# Altium schematic symbol library BAT-HLD-001-THM.SCHLIB: 1 symbol
Pins are listed as number, name and electrical type; pins without a type are passive.

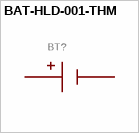
[diagram p0: symbol BAT-HLD-001-THM]

## BAT-HLD-001-THM
designator BT?
GateName_1: G$1; SymbolName_1: BAT-HLD-001-THM; MF: Linx; Description: Battery Retainer Coin, 20.0mm 1 Cell PC Pin; LibraryName: BAT-HLD-001-THM; DeviceSetName: BAT-HLD-001-THM; Package: BAT_BAT-HLD-001-THM; Purchase-URL: https://pricing.snapeda.com/search/part/BAT-HLD-001-THM/?ref=eda; Package: None; MP: BAT-HLD-001-THM; Digi-Key_Part_Number: BAT-HLD-001-THM-ND
footprint BAT_BAT-HLD-001-THM
pins: N, P1-4 P